# Altium footprint library Conectores.PcbLib: 11 footprints
Each footprint in its own frame and in the unit in brackets; x right, y up, seen from the top. Pads: shape width x height; smd on the part's side, far side on the other; paste and mask are expansions set on the pad; w line width, h text height; cw(c..) or ccw(c..) is an arc to the next point about the centre after c.
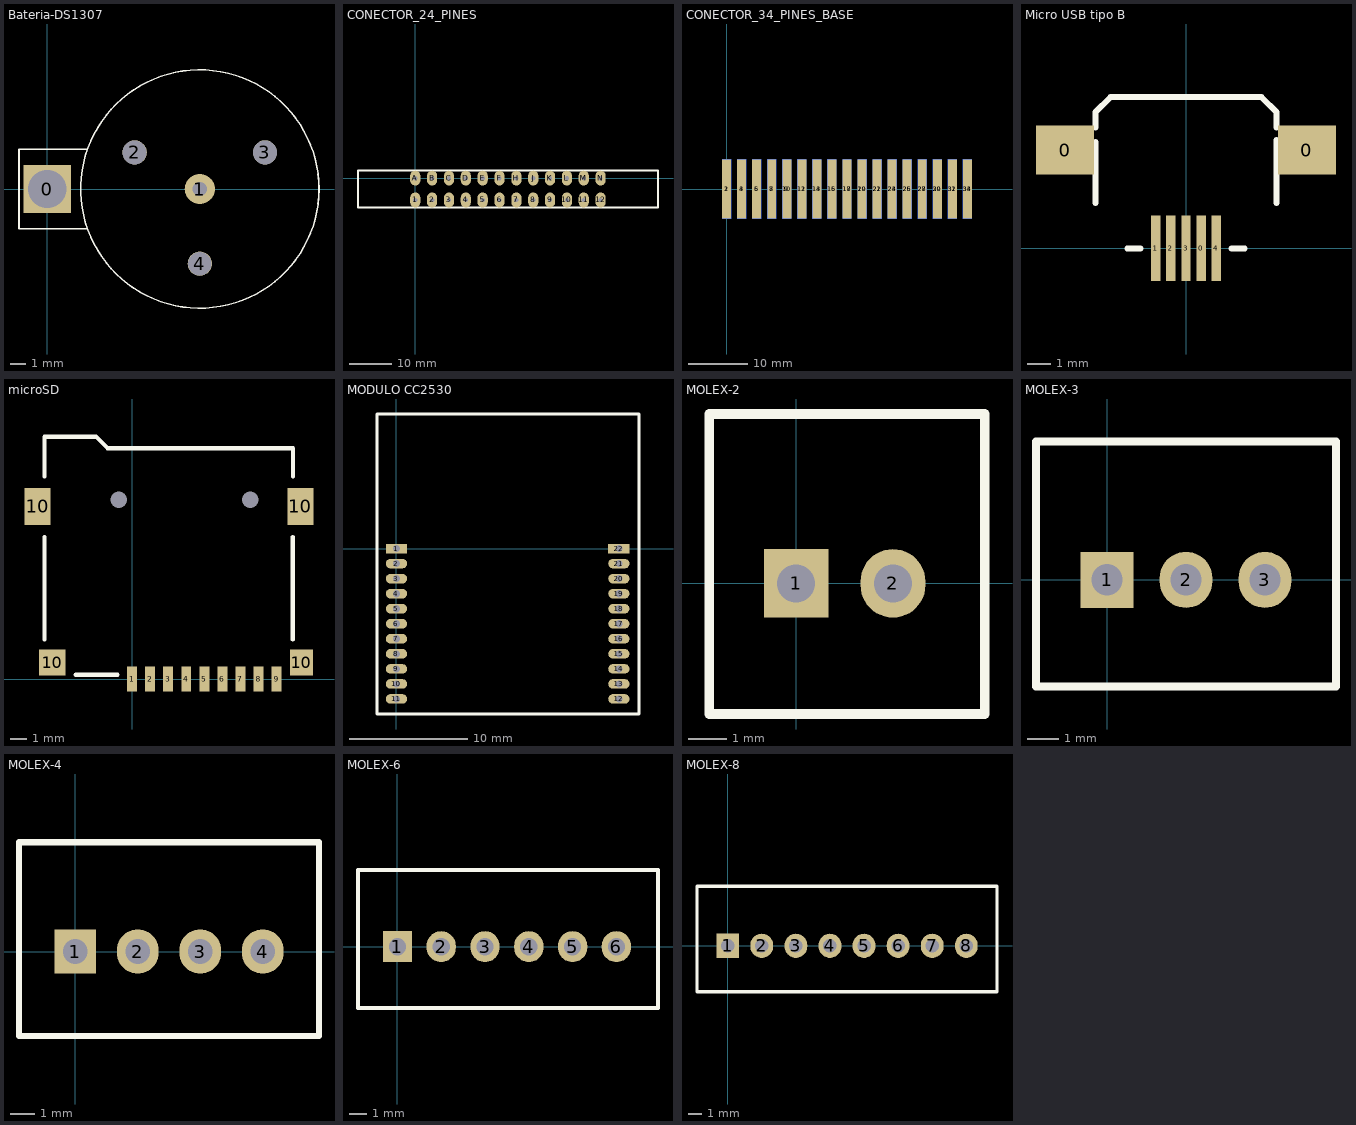
[diagram p0: the footprints below, top view; thin cyan lines are the x and y axes]

## Bateria-DS1307 [mm]
pads (5):
  rect 3x3 hole 2.4: 0(0,0)
  round 1.9 hole 0.9: 1(9.6,0)
  round 1.524 hole 1.5: 2(5.5,2.3) 3(13.7,2.3) 4(9.6,-4.7)
Top Overlay:
  circle w0.1: c9.6,0 r7.5
  lines w0.1: 2.5,-2.5 -1.778,-2.5 -1.778,2.5 2.5,2.5
3D body "500.step": height 4.31, standoff -5.8, extent -1.8,-7.428 17.236,7.629

## CONECTOR_24_PINES [mm]
pads (24):
  oval 2.4x3.5 hole 1: 1(0,-5.15) 2(3.97,-5.15) 3(7.94,-5.15) 4(11.91,-5.15) 5(15.88,-5.15) 6(19.85,-5.15) 7(23.82,-5.15) 8(27.79,-5.15) 9(31.76,-5.15) 10(35.73,-5.15) 11(39.7,-5.15) 12(43.67,-5.15) A(0,0) B(3.97,0) C(7.94,0) D(11.91,0) E(15.88,0) F(19.85,0) H(23.82,0) J(27.79,0) K(31.76,0) L(35.73,0) M(39.7,0) N(43.67,0)
Top Overlay:
  lines w0.5: -13.5,-6.92 -13.5,1.8 57.2,1.8 57.2,-6.92 -13.5,-6.92

## CONECTOR_34_PINES_BASE [mm]
pads (34):
  rect 1.5x9.95 smd: 1(0,0) 3(2.53,0) 5(5.06,0) 7(7.59,0) 9(10.12,0) 11(12.65,0) 13(15.18,0) 15(17.71,0) 17(20.24,0) 19(22.77,0) 21(25.3,0) 23(27.83,0) 25(30.36,0) 27(32.89,0) 29(35.42,0) 31(37.95,0) 33(40.48,0)
  rect 1.5x9.95 smd far side: 2(0,0) 4(2.53,0) 6(5.06,0) 8(7.59,0) 10(10.12,0) 12(12.65,0) 14(15.18,0) 16(17.71,0) 18(20.24,0) 20(22.77,0) 22(25.3,0) 24(27.83,0) 26(30.36,0) 28(32.89,0) 30(35.42,0) 32(37.95,0) 34(40.48,0)
Top Layer:
  text "1" at -2.34,-7.13 h1.52
Bottom Layer:
  text "2" at -1.07,-7.13 h1.52

## Micro USB tipo B [mm]
pads (7):
  rect 2.5x2.1 smd: 0(-5.2,4.225) 0(5.2,4.225)
  rect 0.4x2.8 smd: 0(0.65,0) 1(-1.3,0) 2(-0.65,0) 3(0,0) 4(1.3,0)
Top Overlay:
  lines w0.2: -3.25,6.5 3.25,6.5
  lines w0.254: -3.9,1.95 -3.9,4.575 ; -3.9,5.2 -3.9,5.85 -3.25,6.5 3.25,6.5 3.9,5.85 3.9,5.2 ; -2.525,0 -1.95,0 ; 1.95,0 2.525,0 ; 3.9,1.95 3.9,4.65
3D body "User Library-MicroAB.STEP": height 2.54, standoff -0.46, extent -4.4,1.3 4.4,6.9

## microSD [mm]
pads (15):
  rect 0.6x1.5 smd: 1(0,0) 2(1.1,0) 3(2.2,0) 4(3.3,0) 5(4.4,0) 6(5.5,0) 7(6.6,0) 8(7.7,0) 9(8.8,0)
  rect 1.6x2.26 smd: 10(-5.75,10.5) 10(10.25,10.5)
  rect 1.6x1.6 smd: 10(-4.85,1)
  rect 1.4x1.6 smd: 10(10.3,1)
  round 0.8 hole 1: ""(-0.8,10.9) ""(7.2,10.9)
Top Overlay:
  lines w0.254: -5.334,2.413 -5.334,8.636 ; -5.334,12.319 -5.334,14.732 ; -5.334,14.75 -2.2,14.75 -1.5,14.05 0.75,14.05 9.8,14.05 9.8,12.319 ; -3.429,0.254 -0.889,0.254 ; 9.779,2.413 9.779,8.636
3D body "Micro SD conector.STEP": height 1.95, standoff -0.5, extent -5.75,-0.35 10.25,14.9

## MODULO CC2530 [mm]
pads (22):
  rect 1.8x0.8 hole 0.6: 1(0,0) 22(18.796,0)
  oval 1.8x0.8 hole 0.6: 2(0,-1.27) 3(0,-2.54) 4(0,-3.81) 5(0,-5.08) 6(0,-6.35) 7(0,-7.62) 8(0,-8.89) 9(0,-10.16) 10(0,-11.43) 11(0,-12.7) 12(18.796,-12.7) 13(18.796,-11.43) 14(18.796,-10.16) 15(18.796,-8.89) 16(18.796,-7.62) 17(18.796,-6.35) 18(18.796,-5.08) 19(18.796,-3.81) 20(18.796,-2.54) 21(18.796,-1.27)
Top Overlay:
  lines w0.254: -1.625,-13.975 20.475,-13.975 20.475,11.375 -1.625,11.375 -1.625,-13.975
3D body: height 0, standoff 0, extent -1.752,-14.102 20.602,11.502

## MOLEX-2 [mm]
pads (2):
  rect 1.7x1.8 hole 1: 1(0,0)
  oval 1.7x1.8 hole 1: 2(2.54,0)
Top Overlay:
  lines w0.254: -2.286,-3.429 -2.286,4.445 4.953,4.445 4.953,-3.429 -2.286,-3.429
3D body "hdr-1x2t_2.54_sh7x8.step": height 10.4, standoff -3.6, extent -2.305,-3.5 4.905,4.4

## MOLEX-3 [mm]
pads (3):
  rect 1.7x1.8 hole 1: 1(0,0)
  oval 1.7x1.8 hole 1: 2(2.54,0) 3(5.08,0)
Top Overlay:
  lines w0.254: -2.286,-3.429 7.366,-3.429 7.366,4.445 -2.286,4.445 -2.286,-3.429
3D body "hdr-1x3t_2.54_sh10x8.step": height 10.4, standoff -3.6, extent -2.335,-3.5 7.415,4.4

## MOLEX-4 [mm]
pads (4):
  rect 1.7x1.8 hole 1: 1(0,0)
  oval 1.7x1.8 hole 1: 2(2.54,0) 3(5.08,0) 4(7.62,0)
Top Overlay:
  lines w0.254: -2.286,-3.429 -2.286,4.445 9.906,4.445 9.906,-3.429 -2.286,-3.429
3D body "hdr-1x4t_2.54_sh12x8.step": height 10.5, standoff -3.5, extent -2.335,-3.5 9.955,4.4

## MOLEX-6 [mm]
pads (6):
  rect 1.7x1.8 hole 1: 1(0,0)
  oval 1.7x1.8 hole 1: 2(2.54,0) 3(5.08,0) 4(7.62,0) 5(10.16,0) 6(12.7,0)
Top Overlay:
  lines w0.254: -2.286,-3.556 15.113,-3.556 15.113,4.445 -2.286,4.445 -2.286,-3.556
3D body "hdr-1x6t_2.54_sh17x8.step": height 10.4, standoff -3.6, extent -2.335,-3.5 15.035,4.4

## MOLEX-8 [mm]
pads (8):
  rect 1.7x1.8 hole 1: 1(0,0)
  oval 1.7x1.8 hole 1: 2(2.54,0) 3(5.08,0) 4(7.62,0) 5(10.16,0) 6(12.7,0) 7(15.24,0) 8(17.78,0)
Top Overlay:
  lines w0.254: -2.286,-3.429 -2.286,4.445 20.066,4.445 20.066,-3.429 -2.286,-3.429
3D body "hdr-1x8t_2.54_sh22x8.step": height 10.4, standoff -3.6, extent -2.335,-3.5 20.115,4.4